# EAGLE library part MT3608 (library C3_SCOUT_REVC)
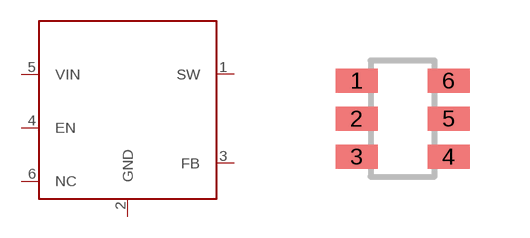
[diagram p2: symbol with the pads of SOT23-6; footprint SOT23-6]

Designator prefix U

## MT3608  [SOT23-6]
1  SW  oc
2  GND  pwr
3  FB  in
4  EN  in
5  VIN  pwr
6  NC  nc

## Footprint SOT23-6 (pad centres in mm)
smd 1.05 x 0.6: 1 -1.15,0.95; 2 -1.15,0; 3 -1.15,-0.95; 4 1.15,-0.95; 5 1.15,0; 6 1.15,0.95